# Altium footprint library Resistor.PcbLib: 13 footprints
Each footprint in its own frame and in the unit in brackets; x right, y up, seen from the top. Pads: shape width x height; smd on the part's side, far side on the other; paste and mask are expansions set on the pad; w line width, h text height; cw(c..) or ccw(c..) is an arc to the next point about the centre after c.
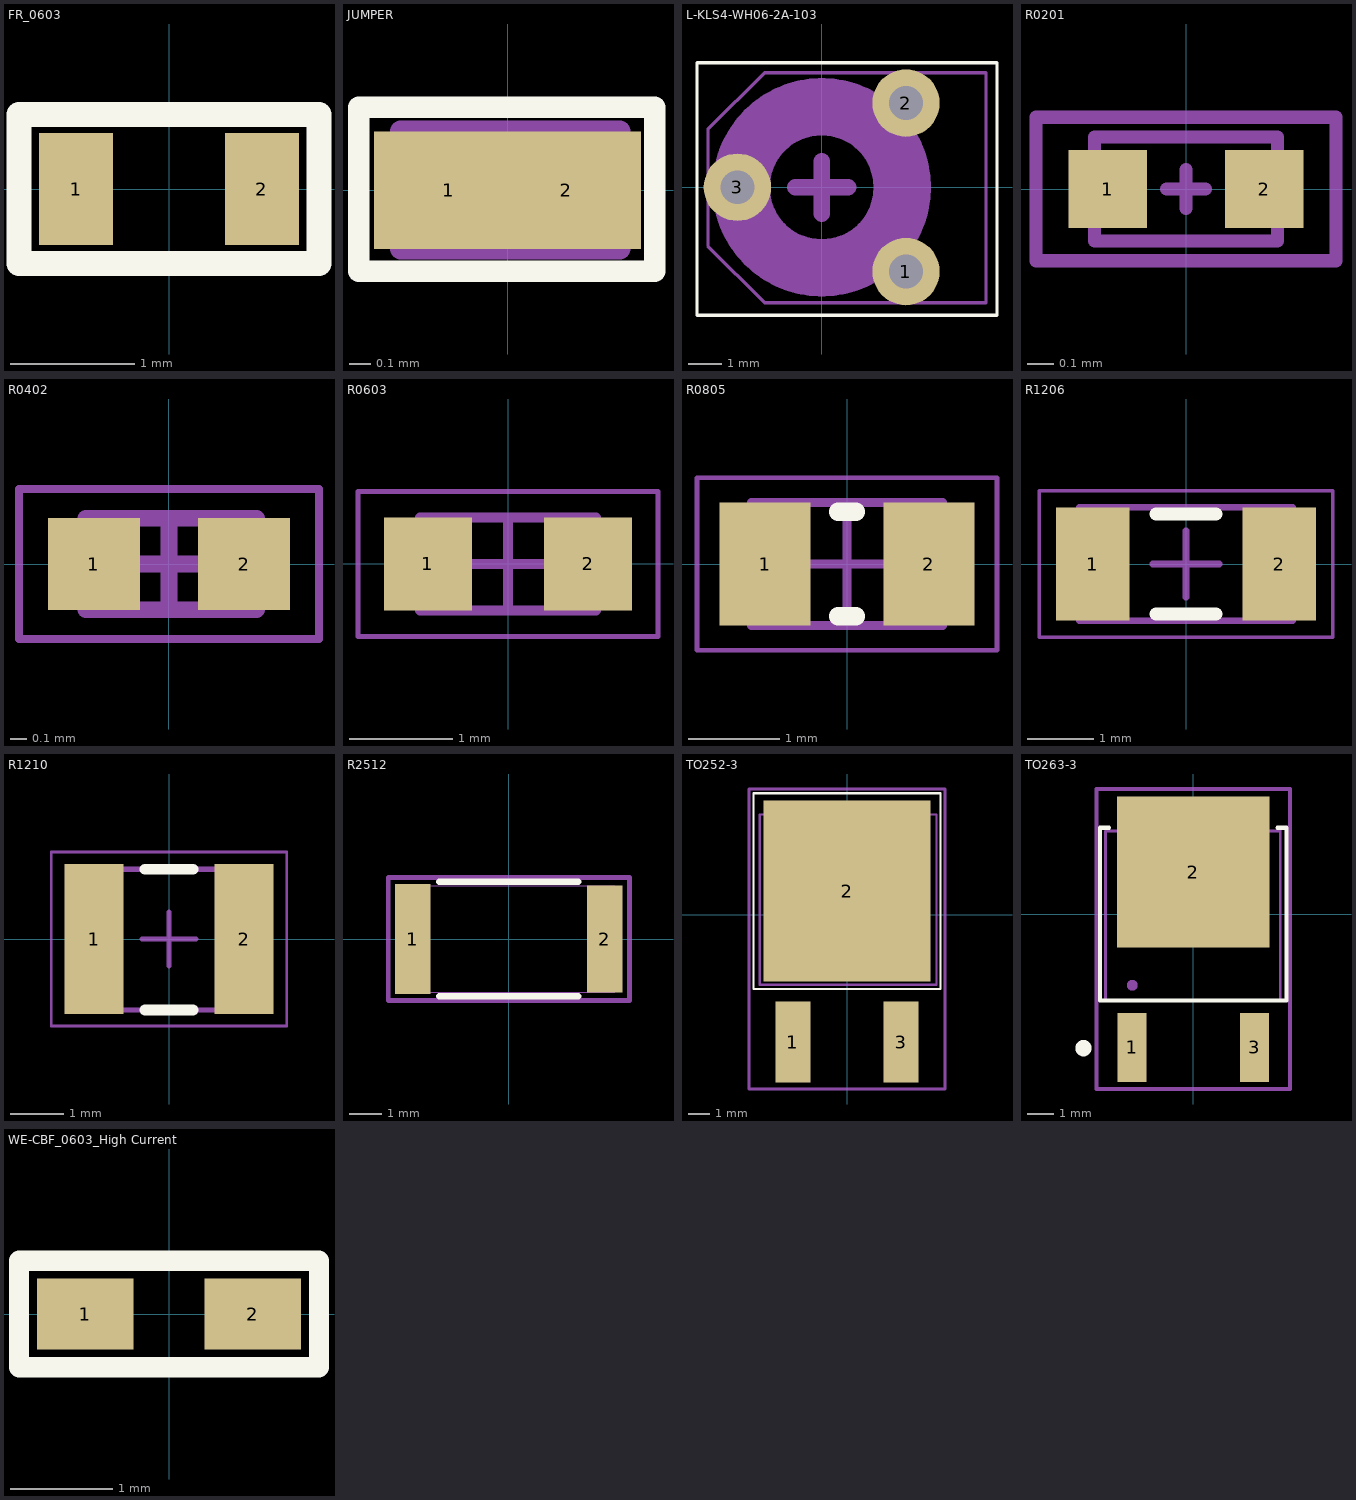
[diagram p0: the footprints below, top view; thin cyan lines are the x and y axes]

## FR_0603 [mm]
pads (2):
  rect 0.6x0.9 smd: 1(-0.75,0) 2(0.75,0)
Top Overlay:
  lines w0.2: -1.21,-0.6 -1.21,0.6 1.21,0.6 1.21,-0.6 -1.21,-0.6
3D body "FR_0603.stp": height 0.81, standoff 0.01, extent -0.8,-0.4 0.8,0.4

## JUMPER [mm] "JUMPER"
height 0.4
pads (2):
  rect 0.7x0.55 smd paste-2539.97 mask-2539.97: 1(-0.275,0) 2(0.275,0)
Top Overlay:
  lines w0.1: -0.698,-0.38 -0.698,0.389 0.689,0.389 0.689,-0.38 -0.698,-0.38
Top Assembly (Mech13):
  rectangle: -0.5,-0.296 -0.39,0.275
  region: 0.525,0.296 0.415,0.296 0.415,-0.275 0.525,-0.275
  lines w0.1: -0.5,-0.275 -0.5,0.275 0.525,0.275 0.525,-0.275 -0.5,-0.275
  text ".Designator" at -1,-0.067 h0.2
Mechanical 15:
  lines w0.05: -0.701,-0.382 0.704,-0.382 0.704,0.392 -0.701,0.392 -0.701,-0.382

## L-KLS4-WH06-2A-103 [mm]
pads (3):
  round 2 hole 1: 1(2.5,-2.5) 2(2.5,2.5) 3(-2.5,0)
Top Overlay:
  lines w0.1: -3.7,-3.8 5.2,-3.8 5.2,3.7 -3.7,3.7 -3.7,-3.8
Top Assembly (Mech13):
  circle w1.7: c0,0 r2.39
  lines w0.1: -3.376,-0.025 -3.376,-1.742 -1.688,-3.43 4.875,-3.43 4.875,3.4 -1.65,3.4 -1.693,3.4 -3.376,1.717 -3.376,0
  lines w0.5: -0.775,0 0,0 ; 0,-0.775 0,0 ; 0,0.775 0,0 ; 0.775,0 0,0
  text ".Designator" at 4.342,-2.499 h0.5
3D body "Trimmer_3306F.STEP": height 7.62, standoff -3.04, extent -3.375,-3.405 4.876,3.405

## R0201 [mm] "Chip Resistor, 2-Leads, Body 0.6x0.30mm, IPC Medium Density"
height 0.4
pads (2):
  rect 0.3x0.3 smd: 1(-0.3,0) 2(0.3,0)
Top Assembly (Mech13):
  lines w0.05: -0.35,-0.2 -0.35,0.2 0.35,0.2 0.35,-0.2 -0.35,-0.2
  text ".Designator" at -1,0.308 h0.2
Mechanical 15:
  lines w0.05: -0.075,0 0.075,0 ; 0,-0.075 0,0.075 ; -0.575,-0.275 0.575,-0.275 0.575,0.275 -0.575,0.275 -0.575,-0.275
3D body "R0201.step": height 0.27, standoff 0.01, extent -0.3,-0.15 0.3,0.15

## R0402 [mm] "Chip Resistor, 2-Leads, Body 1.00x0.50mm, IPC Medium Density"
height 0.4
pads (2):
  rect 0.55x0.55 smd: 1(-0.45,0) 2(0.45,0)
Top Assembly (Mech13):
  rectangle: -0.5,-0.296 -0.39,0.275
  region: 0.525,0.296 0.415,0.296 0.415,-0.275 0.525,-0.275
  lines w0.1: -0.5,-0.275 -0.5,0.275 0.525,0.275 0.525,-0.275 -0.5,-0.275
  text ".Designator" at -1,-0.067 h0.2
Mechanical 15:
  lines w0.05: -0.9,-0.45 0.9,-0.45 0.9,0.45 -0.9,0.45 -0.9,-0.45
  lines w0.1: -0.275,0 0.275,0 ; 0,-0.275 0,0.275
3D body "SMD_0402.step": height 0.36, standoff 0.01, extent -0.5,-0.25 0.5,0.25

## R0603 [mm] "Chip Resistor, 2-Leads, Body 1.60x0.80mm, IPC Medium Density"
height 0.55
pads (2):
  rect 0.85x0.9 smd: 1(-0.775,0) 2(0.775,0)
Top Assembly (Mech13):
  rectangle: 0.683,-0.465 0.833,0.442
  rectangle: -0.85,-0.45 -0.7,0.457
  lines w0.1: -0.85,-0.45 -0.85,0.45 0.85,0.45 0.85,-0.45 -0.85,-0.45
  text ".Designator" at -1.5,-0.1 h0.3
Mechanical 15:
  lines w0.05: -1.45,-0.7 -1.45,0.7 1.45,0.7 1.45,-0.7 -1.45,-0.7
  lines w0.1: -0.45,0 0.45,0 ; 0,-0.45 0,0.45
3D body "R0603.step": height 0.46, standoff 0.01, extent -0.8,-0.4 0.8,0.4

## R0805 [mm] "Chip Resistor, 2-Leads, Body 2.00x1.25mm, IPC Medium Density"
height 0.6
pads (2):
  rect 1x1.35 smd: 1(-0.9,0) 2(0.9,0)
Top Overlay:
  lines w0.2: -0.1,-0.575 0.1,-0.575 ; -0.1,0.575 0.1,0.575
Top Assembly (Mech13):
  rectangle: -1.05,-0.701 -0.752,0.675
  rectangle: 0.775,-0.676 1.073,0.7
  lines w0.1: -1.05,-0.675 -1.05,0.675 1.05,0.675 1.05,-0.675 -1.05,-0.675
  text ".Designator" at -1.999,-0.133 h0.4
Mechanical 15:
  lines w0.05: -1.65,-0.95 -1.65,0.95 1.65,0.95 1.65,-0.95 -1.65,-0.95
  lines w0.1: -0.5,0 0.5,0 ; 0,-0.5 0,0.5
3D body "R0805.step": height 0.61, standoff 0.01, extent -1,-0.625 1,0.625

## R1206 [mm] "Chip Resistor, 2-Leads, Body 3.10x1.60mm, IPC Medium Density"
height 0.65
pads (2):
  rect 1.1x1.7 smd: 1(-1.4,0) 2(1.4,0)
Top Overlay:
  lines w0.2: -0.45,-0.75 0.45,-0.75 ; -0.45,0.75 0.45,0.75
Top Assembly (Mech13):
  rectangle: 1.275,-0.825 1.575,0.875
  rectangle: -1.6,-0.85 -1.3,0.85
  lines w0.1: -1.6,-0.85 -1.6,0.85 1.6,0.85 1.6,-0.85 -1.6,-0.85
  text ".Designator" at -2.899,-0.193 h0.58
Mechanical 15:
  lines w0.05: -2.2,-1.1 -2.2,1.1 2.2,1.1 2.2,-1.1 -2.2,-1.1
  lines w0.1: -0.5,0 0.5,0 ; 0,-0.5 0,0.5
3D body "R1206.step": height 0.61, standoff 0.01, extent -1.6,-0.8 1.6,0.8

## R1210 [mm]
height 0.65
pads (2):
  rect 1.1x2.8 smd: 1(-1.4,0) 2(1.4,0)
Top Overlay:
  lines w0.2: -0.45,-1.325 0.45,-1.325 ; -0.45,1.3 0.45,1.3
Top Assembly (Mech13):
  rectangle: -1.6,-1.325 -1.15,1.3
  region: 1.6,1.325 1.15,1.325 1.15,-1.3 1.6,-1.3
  lines w0.1: -1.6,-1.325 1.6,-1.325 1.6,1.3 -1.6,1.3 -1.6,-1.325
  text ".Designator" at 0.193,-2.899 h0.58
Mechanical 15:
  lines w0.05: -2.2,-1.625 2.2,-1.625 2.2,1.625 -2.2,1.625 -2.2,-1.625
  lines w0.1: -0.5,0 0.5,0 ; 0,-0.5 0,0.5
3D body "R1210.STEP": height 0.66, standoff 0.01, extent -1.55,-1.3 1.55,1.3

## R2512 [mm]
pads (2):
  rect 1.1x3.4 smd paste+0 mask+0: 1(-2.972,0)
  rect 1.1x3.302 smd paste+0 mask+0: 2(2.972,0)
Top Overlay:
  lines w0.2: -2.156,-1.778 2.156,-1.778 ; -2.156,1.778 2.156,1.778
Top Assembly (Mech13):
  rectangle: 2.464,-1.651 3.277,1.651
  rectangle: -3.277,-1.651 -2.464,1.651
  lines w0.025: -3.277,-1.651 -3.277,1.651 ; -3.277,-1.651 3.277,-1.651 ; -3.277,-1.651 -2.464,-1.651 -2.464,1.651 -3.277,1.651 ; -3.277,-1.651 -3.277,1.651 ; -3.277,1.651 3.277,1.651 ; 3.277,-1.651 3.277,1.651 ; 3.277,-1.651 3.277,1.651 ; 3.277,-1.651 2.464,-1.651 2.464,1.651 3.277,1.651
  text ".Designator" at -2.899,-0.193 h0.58
Mechanical 15:
  lines w0.152: -3.734,-1.905 3.734,-1.905 3.734,1.905 -3.734,1.905 -3.734,-1.905
3D body "STA_CSRN2512_STP.step": height 0.71, standoff 0, extent -3.277,-1.651 3.277,1.651

## TO252-3 [mm]
pads (3):
  rect 1.65x3.81 smd: 1(-2.54,-6) 3(2.54,-6)
  rect 7.87x8.51 smd: 2(0,1.1)
Top Overlay:
  lines w0.1: -4.4,-3.5 -4.4,5.7 4.4,5.7 4.4,-3.5 -4.4,-3.5
Top Assembly (Mech13):
  circle w0.3: c-2.275,-2.652 r0.05
  rectangle: -2.923,-6.525 -2.157,-4.525
  rectangle: 2.157,-6.525 2.923,-4.525
  rectangle: -2.54,4.674 2.663,5.3
  lines w0.1: -4.1,-3.3 4.2,-3.3 4.2,4.7 -4.1,4.7 -4.1,-3.3
  text ".Designator" at -3.764,-0.257 h0.75
Mechanical 15:
  lines w0.152: -4.6,-8.2 -4.6,5.9 4.6,5.9 4.6,-8.2 -4.6,-8.2
3D body "TO-252-3.stp": height 2.91, standoff -0.03, extent -4.058,-7.147 4.142,5.25

## TO263-3 [mil]
pads (3):
  rect 42x102 smd: 1(-90,-195.87) 3(90,-195.87)
  rect 224x222 smd: 2(0,62)
Top Overlay:
  circle w20: c-161.42,-196.85 r1.93
  lines w6: -124.1,127 -137,127 -137,-127 137,-127 137,127 124.1,127
Top Assembly (Mech13):
  circle w11.81: c-89.57,-104.41 r1.97
  rectangle: -102.47,122.4 102.36,162.49
  rectangle: 74.78,-228.78 104.9,-144.87
  rectangle: -105.22,-228.78 -75.1,-144.87
  lines w3.94: -128.94,122.05 -128.94,-126.97 127.95,-126.97 127.95,122.4 -128.94,122.4
  text ".Designator" at -148.21,-10.11 h29.53
Mechanical 15:
  lines w6: -142,-256.87 142,-256.87 142,184 -142,184 -142,-256.87
3D body "TO263-3.STEP": height 189.27, standoff 0.29, extent -195.87,-243.7 197.83,373.23

## WE-CBF_0603_High Current [mm] "SMD EMI Suppression Ferrite  Bead, body 1.6x0.8mm"
height 1
pads (2):
  rect 0.95x0.7 smd: 1(-0.825,0) 2(0.825,0)
Top Overlay:
  lines w0.2: -1.475,-0.525 1.475,-0.525 1.475,0.525 -1.475,0.525 -1.475,-0.525
3D body "WE-CBF_0603_CBF.stp": height 0.8, standoff 0, extent -0.8,-0.4 0.8,0.4